# Altium schematic symbol library CL10B103KA8WPNC.SchLib: 1 symbol
Pins are listed as number, name and electrical type; pins without a type are passive.

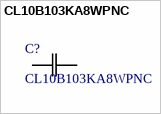
[diagram p0: symbol CL10B103KA8WPNC]

## CL10B103KA8WPNC
designator C?
No Description Available; Manufacturer_Name: Samsung; Copyright: Copyright (C) 2026 Ultra Librarian. All rights reserved.; Manufacturer_Part_Number: CL10B103KA8WPNC
footprint CAP_CL_10_SAM
pins: 1, 2